# Altium footprint library DIP762W50P254L458H480Q4.PcbLib: 1 footprints
Each footprint in its own frame and in the unit in brackets; x right, y up, seen from the top. Pads: shape width x height; smd on the part's side, far side on the other; paste and mask are expansions set on the pad; w line width, h text height; cw(c..) or ccw(c..) is an arc to the next point about the centre after c.
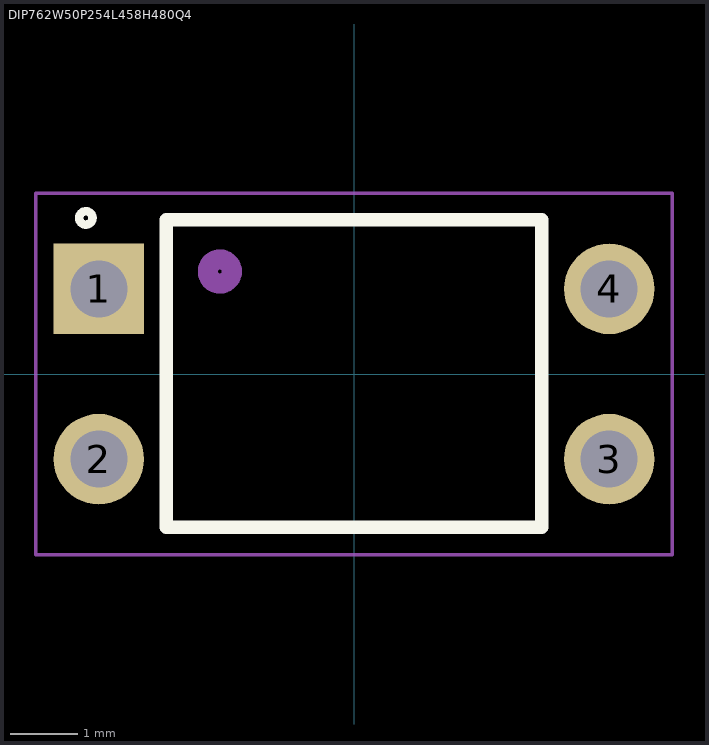
[diagram p0: the footprint, top view; thin cyan lines are the x and y axes]

## DIP762W50P254L458H480Q4 [mm]
pads (4):
  rect 1.35x1.35 / inner round 1.35 / far side rect 1.35x1.35 hole 0.85: 1(-3.81,1.27)
  round 1.35 hole 0.85: 2(-3.81,-1.27) 3(3.81,-1.27) 4(3.81,1.27)
Top Overlay:
  circle w0.127: c-4.003,2.33 r0.1
  lines w0.2: -2.8,2.29 -2.8,-2.29 2.8,-2.29 2.8,2.29 ; -2.8,2.3 2.8,2.3
Assembly Top:
  circle w0.3: c-2.003,1.53 r0.18
Courtyard Top:
  lines w0.05: -4.75,-2.7 -4.75,2.7 4.75,2.7 4.75,-2.7 -4.75,-2.7
3D body "step_temp.STEP": height 4.8, standoff -3.3, extent -3.94,-2.29 3.94,2.29